# Altium integrated library Adafruit_TCS34725_Module.IntLib: 1 symbol
Pins are listed as number, name and electrical type; pins without a type are passive.

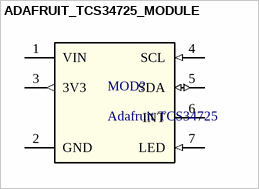
[diagram p0: symbol ADAFRUIT_TCS34725_MODULE]

## ADAFRUIT_TCS34725_MODULE
designator MOD?, comment Adafruit TCS34725
Adafruit TCS34725 complete 20.32mm color sensor module
footprint ADAFRUIT_TCS34725_MODULE
pins: 1 VIN (power), 2 GND (power), 3 3V3 (out), 4 SCL (in), 5 SDA (io), 6 INT (oc), 7 LED (in)